# EAGLE library part SIM800L-MODULE (library moto-safety)
SIM800L-MODULE SIM800L GSM/GPRS mini kart (park modu bildirimi). VCC 3.4-4.4V, 2A tepe. Kart: 25.0 x 23.0 mm - Guven: M STEP: GrabCAD 'SIM800L module'
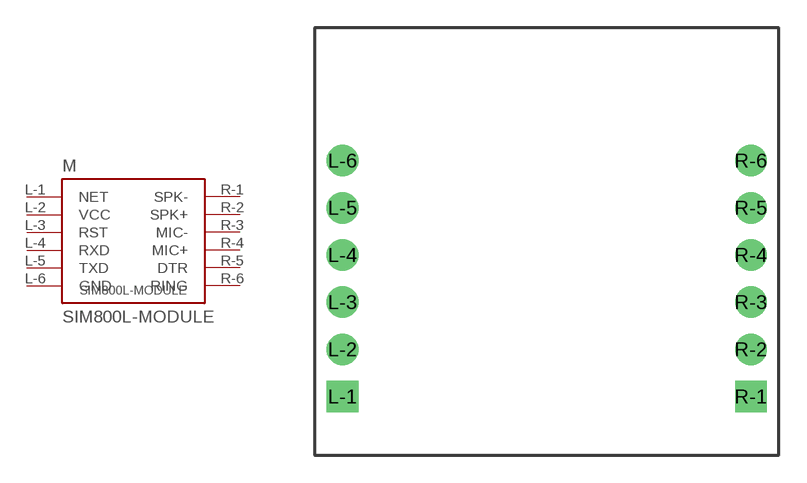
[diagram p2: symbol with the pads of SIM800L-MODULE; footprint SIM800L-MODULE]

Designator prefix M

## SIM800L-MODULE (BOARD_SIZE: 25.0x23.0mm; CONFIDENCE: M)  [SIM800L-MODULE]
L-1  NET  pas
L-2  VCC  pas
L-3  RST  pas
L-4  RXD  pas
L-5  TXD  pas
L-6  GND  pas
R-1  SPK-  pas
R-2  SPK+  pas
R-3  MIC-  pas
R-4  MIC+  pas
R-5  DTR  pas
R-6  RING  pas

## Footprint SIM800L-MODULE (pad centres in mm)
SIM800L GSM/GPRS mini kart (park modu bildirimi). VCC 3.4-4.4V, 2A tepe. | Kart: 25.0 x 23.0 mm | Guven: M
drill 1 pad 1.7 square: L-1 -11,-8.35; R-1 11,-8.35
drill 1 pad 1.7 round: L-2 -11,-5.81; L-3 -11,-3.27; L-4 -11,-0.73; L-5 -11,1.81; L-6 -11,4.35; R-2 11,-5.81; R-3 11,-3.27; R-4 11,-0.73; R-5 11,1.81; R-6 11,4.35